# Altium footprint library PE42540F-Z.PcbLib: 3 footprints
Each footprint in its own frame and in the unit in brackets; x right, y up, seen from the top. Pads: shape width x height; smd on the part's side, far side on the other; paste and mask are expansions set on the pad; w line width, h text height; cw(c..) or ccw(c..) is an arc to the next point about the centre after c.
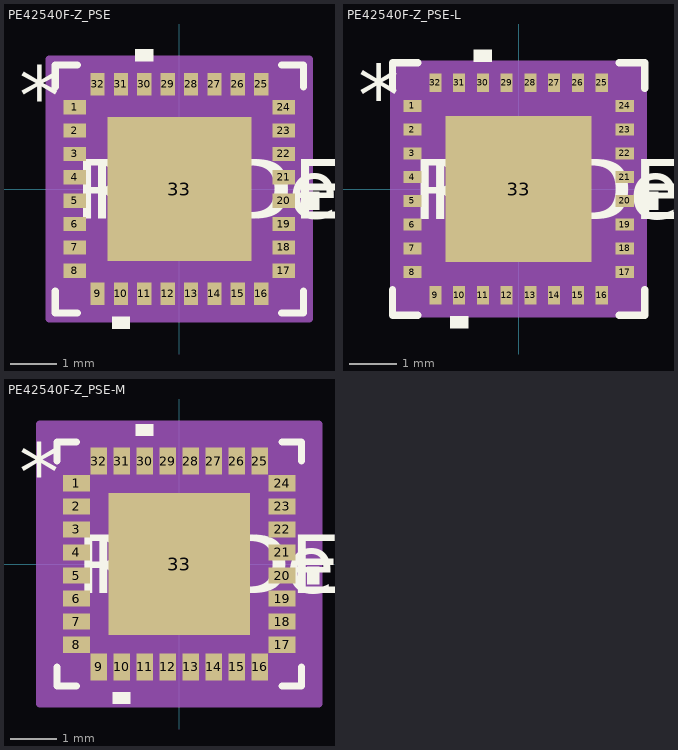
[diagram p0: the footprints below, top view; thin cyan lines are the x and y axes]

## PE42540F-Z_PSE [mil]
pads (33):
  rect 19x12 smd paste+0 mask+0: 1(-88,68.9) 2(-88,49.21) 3(-88,29.53) 4(-88,9.84) 5(-88,-9.84) 6(-88,-29.53) 7(-88,-49.21) 8(-88,-68.9) 17(88,-68.9) 18(88,-49.21) 19(88,-29.53) 20(88,-9.84) 21(88,9.84) 22(88,29.53) 23(88,49.21) 24(88,68.9)
  rect 12x19 smd paste+0 mask+0: 9(-68.9,-88) 10(-49.21,-88) 11(-29.53,-88) 12(-9.84,-88) 13(9.84,-88) 14(29.53,-88) 15(49.21,-88) 16(68.9,-88) 25(68.9,88) 26(49.21,88) 27(29.53,88) 28(9.84,88) 29(-9.84,88) 30(-29.53,88) 31(-49.21,88) 32(-68.9,88)
  rect 121x121 smd paste-60.5 mask+0: 33(0,0)
Top Overlay:
  region: -41.71,-107.5 -56.71,-107.5 -56.71,-117.5 -41.71,-117.5
  region: 107.5,-2.34 117.5,-2.34 117.5,-17.34 107.5,-17.34
  region: -22.03,107.5 -37.03,107.5 -37.03,117.5 -22.03,117.5
  lines w6: -104.5,-85.97 -104.5,-104.5 -85.97,-104.5 ; -104.5,85.97 -104.5,104.5 -85.97,104.5 ; 85.97,-104.5 104.5,-104.5 104.5,-85.97 ; 85.97,104.5 104.5,104.5 104.5,85.97
  text "*" at -135,53.74 h50
  text "RefDes" at -75,-25 h50
  text "REFDES" at -87.5,-25 h50
Top Paste:
  region: -3.94,56.56 -56.56,56.56 -56.56,3.94 -3.94,3.94
  region: -3.94,-3.94 -56.56,-3.94 -56.56,-56.56 -3.94,-56.56
  region: 56.56,56.56 3.94,56.56 3.94,3.94 56.56,3.94
  region: 56.56,-3.94 3.94,-3.94 3.94,-56.56 56.56,-56.56
Mechanical 13:
  lines w1: -99.5,49.5 -49.5,99.5 ; -99.5,-99.5 99.5,-99.5 ; -99.5,-99.5 -99.5,99.5 ; -99.5,-99.5 -99.5,-99.5 ; -99.5,99.5 99.5,99.5 ; -99.5,99.5 -99.5,99.5 ; 99.5,-99.5 99.5,-99.5 ; 99.5,-99.5 99.5,99.5 ; 99.5,99.5 99.5,99.5 ; -99.5,-74.9 -99.5,-62.9 -97.5,-62.9 -97.5,-74.9 -99.5,-74.9 ; -99.5,-55.21 -99.5,-43.21 -97.5,-43.21 -97.5,-55.21 -99.5,-55.21 ; -99.5,-35.53 -99.5,-23.53 -97.5,-23.53 -97.5,-35.53 -99.5,-35.53 ; -99.5,-15.84 -99.5,-3.84 -97.5,-3.84 -97.5,-15.84 -99.5,-15.84 ; -99.5,3.84 -99.5,15.84 -97.5,15.84 -97.5,3.84 -99.5,3.84 ; -99.5,23.53 -99.5,35.53 -97.5,35.53 -97.5,23.53 -99.5,23.53 ; -99.5,43.21 -99.5,55.21 -97.5,55.21 -97.5,43.21 -99.5,43.21 ; -99.5,62.9 -99.5,74.9 -97.5,74.9 -97.5,62.9 -99.5,62.9 ; -74.9,-99.5 -62.9,-99.5 -62.9,-97.5 -74.9,-97.5 -74.9,-99.5 ; -74.9,97.5 -62.9,97.5 -62.9,99.5 -74.9,99.5 -74.9,97.5 ; -55.21,-99.5 -43.21,-99.5 -43.21,-97.5 -55.21,-97.5 -55.21,-99.5 ; -55.21,97.5 -43.21,97.5 -43.21,99.5 -55.21,99.5 -55.21,97.5 ; -35.53,-99.5 -23.53,-99.5 -23.53,-97.5 -35.53,-97.5 -35.53,-99.5 ; -35.53,97.5 -23.53,97.5 -23.53,99.5 -35.53,99.5 -35.53,97.5 ; -15.84,-99.5 -3.84,-99.5 -3.84,-97.5 -15.84,-97.5 -15.84,-99.5 ; -15.84,97.5 -3.84,97.5 -3.84,99.5 -15.84,99.5 -15.84,97.5 ; 3.84,-99.5 15.84,-99.5 15.84,-97.5 3.84,-97.5 3.84,-99.5 ; 3.84,97.5 15.84,97.5 15.84,99.5 3.84,99.5 3.84,97.5 ; 23.53,-99.5 35.53,-99.5 35.53,-97.5 23.53,-97.5 23.53,-99.5 ; 23.53,97.5 35.53,97.5 35.53,99.5 23.53,99.5 23.53,97.5 ; 43.21,-99.5 55.21,-99.5 55.21,-97.5 43.21,-97.5 43.21,-99.5 ; 43.21,97.5 55.21,97.5 55.21,99.5 43.21,99.5 43.21,97.5 ; 62.9,-99.5 74.9,-99.5 74.9,-97.5 62.9,-97.5 62.9,-99.5 ; 62.9,97.5 74.9,97.5 74.9,99.5 62.9,99.5 62.9,97.5 ; 97.5,-74.9 99.5,-74.9 99.5,-62.9 97.5,-62.9 97.5,-74.9 ; 97.5,-55.21 99.5,-55.21 99.5,-43.21 97.5,-43.21 97.5,-55.21 ; 97.5,-35.53 99.5,-35.53 99.5,-23.53 97.5,-23.53 97.5,-35.53 ; 97.5,-15.84 99.5,-15.84 99.5,-3.84 97.5,-3.84 97.5,-15.84 ; 97.5,3.84 99.5,3.84 99.5,15.84 97.5,15.84 97.5,3.84 ; 97.5,23.53 99.5,23.53 99.5,35.53 97.5,35.53 97.5,23.53 ; 97.5,43.21 99.5,43.21 99.5,55.21 97.5,55.21 97.5,43.21 ; 97.5,62.9 99.5,62.9 99.5,74.9 97.5,74.9 97.5,62.9
  text "*" at -91,53.74 h50
  text "RefDes2" at -87.5,-25 h50
Mechanical 15:
  region: -84.9,-109.5 -109.5,-109.5 -109.5,-84.9 -109.5,84.9 -109.5,109.5 -84.9,109.5 84.9,109.5 109.5,109.5 109.5,84.9 109.5,-84.9 109.5,-109.5 84.9,-109.5
  lines w6: -109.5,-84.9 -109.5,-109.5 -84.9,-109.5 ; -109.5,-84.9 -109.5,-84.9 ; -109.5,-84.9 -109.5,84.9 ; -109.5,84.9 -109.5,84.9 ; -109.5,84.9 -109.5,109.5 -84.9,109.5 ; -84.9,-109.5 84.9,-109.5 ; -84.9,-109.5 -84.9,-109.5 ; -84.9,109.5 -84.9,109.5 ; -84.9,109.5 84.9,109.5 ; 84.9,-109.5 109.5,-109.5 109.5,-84.9 ; 84.9,-109.5 84.9,-109.5 ; 84.9,109.5 84.9,109.5 ; 84.9,109.5 109.5,109.5 109.5,84.9 ; 109.5,-84.9 109.5,84.9 ; 109.5,-84.9 109.5,-84.9 ; 109.5,84.9 109.5,84.9
3D body "PE42540F-Z_PSE.step": height 39.09, standoff 0, extent -99.49,-99.49 99.49,99.49

## PE42540F-Z_PSE-L [mil]
pads (33):
  rect 15x10 smd paste+0 mask+0: 1(-88,68.9) 2(-88,49.21) 3(-88,29.53) 4(-88,9.84) 5(-88,-9.84) 6(-88,-29.53) 7(-88,-49.21) 8(-88,-68.9) 17(88,-68.9) 18(88,-49.21) 19(88,-29.53) 20(88,-9.84) 21(88,9.84) 22(88,29.53) 23(88,49.21) 24(88,68.9)
  rect 10x15 smd paste+0 mask+0: 9(-68.9,-88) 10(-49.21,-88) 11(-29.53,-88) 12(-9.84,-88) 13(9.84,-88) 14(29.53,-88) 15(49.21,-88) 16(68.9,-88) 25(68.9,88) 26(49.21,88) 27(29.53,88) 28(9.84,88) 29(-9.84,88) 30(-29.53,88) 31(-49.21,88) 32(-68.9,88)
  rect 121x121 smd paste-60.5 mask+0: 33(0,0)
Top Overlay:
  region: -41.71,-105.5 -56.71,-105.5 -56.71,-115.5 -41.71,-115.5
  region: 105.5,-2.34 115.5,-2.34 115.5,-17.34 105.5,-17.34
  region: -22.03,105.5 -37.03,105.5 -37.03,115.5 -22.03,115.5
  lines w6: -104.5,-83.42 -104.5,-104.5 -83.42,-104.5 ; -104.5,83.42 -104.5,104.5 -83.42,104.5 ; 83.42,-104.5 104.5,-104.5 104.5,-83.42 ; 83.42,104.5 104.5,104.5 104.5,83.42
  text "*" at -133,53.74 h50
  text "RefDes" at -75,-25 h50
  text "REFDES" at -87.5,-25 h50
Top Paste:
  region: -3.94,56.56 -56.56,56.56 -56.56,3.94 -3.94,3.94
  region: -3.94,-3.94 -56.56,-3.94 -56.56,-56.56 -3.94,-56.56
  region: 56.56,56.56 3.94,56.56 3.94,3.94 56.56,3.94
  region: 56.56,-3.94 3.94,-3.94 3.94,-56.56 56.56,-56.56
Mechanical 13:
  lines w1: -99.5,49.5 -49.5,99.5 ; -99.5,-99.5 99.5,-99.5 ; -99.5,-99.5 -99.5,99.5 ; -99.5,-99.5 -99.5,-99.5 ; -99.5,99.5 99.5,99.5 ; -99.5,99.5 -99.5,99.5 ; 99.5,-99.5 99.5,-99.5 ; 99.5,-99.5 99.5,99.5 ; 99.5,99.5 99.5,99.5 ; -99.5,-74.9 -99.5,-62.9 -97.5,-62.9 -97.5,-74.9 -99.5,-74.9 ; -99.5,-55.21 -99.5,-43.21 -97.5,-43.21 -97.5,-55.21 -99.5,-55.21 ; -99.5,-35.53 -99.5,-23.53 -97.5,-23.53 -97.5,-35.53 -99.5,-35.53 ; -99.5,-15.84 -99.5,-3.84 -97.5,-3.84 -97.5,-15.84 -99.5,-15.84 ; -99.5,3.84 -99.5,15.84 -97.5,15.84 -97.5,3.84 -99.5,3.84 ; -99.5,23.53 -99.5,35.53 -97.5,35.53 -97.5,23.53 -99.5,23.53 ; -99.5,43.21 -99.5,55.21 -97.5,55.21 -97.5,43.21 -99.5,43.21 ; -99.5,62.9 -99.5,74.9 -97.5,74.9 -97.5,62.9 -99.5,62.9 ; -74.9,-99.5 -62.9,-99.5 -62.9,-97.5 -74.9,-97.5 -74.9,-99.5 ; -74.9,97.5 -62.9,97.5 -62.9,99.5 -74.9,99.5 -74.9,97.5 ; -55.21,-99.5 -43.21,-99.5 -43.21,-97.5 -55.21,-97.5 -55.21,-99.5 ; -55.21,97.5 -43.21,97.5 -43.21,99.5 -55.21,99.5 -55.21,97.5 ; -35.53,-99.5 -23.53,-99.5 -23.53,-97.5 -35.53,-97.5 -35.53,-99.5 ; -35.53,97.5 -23.53,97.5 -23.53,99.5 -35.53,99.5 -35.53,97.5 ; -15.84,-99.5 -3.84,-99.5 -3.84,-97.5 -15.84,-97.5 -15.84,-99.5 ; -15.84,97.5 -3.84,97.5 -3.84,99.5 -15.84,99.5 -15.84,97.5 ; 3.84,-99.5 15.84,-99.5 15.84,-97.5 3.84,-97.5 3.84,-99.5 ; 3.84,97.5 15.84,97.5 15.84,99.5 3.84,99.5 3.84,97.5 ; 23.53,-99.5 35.53,-99.5 35.53,-97.5 23.53,-97.5 23.53,-99.5 ; 23.53,97.5 35.53,97.5 35.53,99.5 23.53,99.5 23.53,97.5 ; 43.21,-99.5 55.21,-99.5 55.21,-97.5 43.21,-97.5 43.21,-99.5 ; 43.21,97.5 55.21,97.5 55.21,99.5 43.21,99.5 43.21,97.5 ; 62.9,-99.5 74.9,-99.5 74.9,-97.5 62.9,-97.5 62.9,-99.5 ; 62.9,97.5 74.9,97.5 74.9,99.5 62.9,99.5 62.9,97.5 ; 97.5,-74.9 99.5,-74.9 99.5,-62.9 97.5,-62.9 97.5,-74.9 ; 97.5,-55.21 99.5,-55.21 99.5,-43.21 97.5,-43.21 97.5,-55.21 ; 97.5,-35.53 99.5,-35.53 99.5,-23.53 97.5,-23.53 97.5,-35.53 ; 97.5,-15.84 99.5,-15.84 99.5,-3.84 97.5,-3.84 97.5,-15.84 ; 97.5,3.84 99.5,3.84 99.5,15.84 97.5,15.84 97.5,3.84 ; 97.5,23.53 99.5,23.53 99.5,35.53 97.5,35.53 97.5,23.53 ; 97.5,43.21 99.5,43.21 99.5,55.21 97.5,55.21 97.5,43.21 ; 97.5,62.9 99.5,62.9 99.5,74.9 97.5,74.9 97.5,62.9
  text "*" at -93,53.74 h50
  text "RefDes2" at -87.5,-25 h50
Mechanical 15:
  region: -77.9,-103.5 -103.5,-103.5 -103.5,-77.9 -103.5,77.9 -103.5,103.5 -77.9,103.5 77.9,103.5 103.5,103.5 103.5,77.9 103.5,-77.9 103.5,-103.5 77.9,-103.5
  lines w6: -103.5,-77.9 -103.5,-103.5 -77.9,-103.5 ; -103.5,-77.9 -103.5,-77.9 ; -103.5,-77.9 -103.5,77.9 ; -103.5,77.9 -103.5,77.9 ; -103.5,77.9 -103.5,103.5 -77.9,103.5 ; -77.9,-103.5 77.9,-103.5 ; -77.9,-103.5 -77.9,-103.5 ; -77.9,103.5 -77.9,103.5 ; -77.9,103.5 77.9,103.5 ; 77.9,-103.5 103.5,-103.5 103.5,-77.9 ; 77.9,-103.5 77.9,-103.5 ; 77.9,103.5 77.9,103.5 ; 77.9,103.5 103.5,103.5 103.5,77.9 ; 103.5,-77.9 103.5,77.9 ; 103.5,-77.9 103.5,-77.9 ; 103.5,77.9 103.5,77.9
3D body "PE42540F-Z_PSE.step": height 39.09, standoff 0, extent -99.49,-99.49 99.49,99.49

## PE42540F-Z_PSE-M [mil]
pads (33):
  rect 23x14 smd paste+0 mask+0: 1(-88,68.9) 2(-88,49.21) 3(-88,29.53) 4(-88,9.84) 5(-88,-9.84) 6(-88,-29.53) 7(-88,-49.21) 8(-88,-68.9) 17(88,-68.9) 18(88,-49.21) 19(88,-29.53) 20(88,-9.84) 21(88,9.84) 22(88,29.53) 23(88,49.21) 24(88,68.9)
  rect 14x23 smd paste+0 mask+0: 9(-68.9,-88) 10(-49.21,-88) 11(-29.53,-88) 12(-9.84,-88) 13(9.84,-88) 14(29.53,-88) 15(49.21,-88) 16(68.9,-88) 25(68.9,88) 26(49.21,88) 27(29.53,88) 28(9.84,88) 29(-9.84,88) 30(-29.53,88) 31(-49.21,88) 32(-68.9,88)
  rect 121x121 smd paste-60.5 mask+0: 33(0,0)
Top Overlay:
  region: -41.71,-109.5 -56.71,-109.5 -56.71,-119.5 -41.71,-119.5
  region: 109.5,-2.34 119.5,-2.34 119.5,-17.34 109.5,-17.34
  region: -22.03,109.5 -37.03,109.5 -37.03,119.5 -22.03,119.5
  lines w6: -104.5,-88.01 -104.5,-104.5 -88.01,-104.5 ; -104.5,88.01 -104.5,104.5 -88.01,104.5 ; 88.01,-104.5 104.5,-104.5 104.5,-88.01 ; 88.01,104.5 104.5,104.5 104.5,88.01
  text "*" at -137,53.74 h50
  text "RefDes" at -75,-25 h50
  text "REFDES" at -87.5,-25 h50
Top Paste:
  region: -3.94,56.56 -56.56,56.56 -56.56,3.94 -3.94,3.94
  region: -3.94,-3.94 -56.56,-3.94 -56.56,-56.56 -3.94,-56.56
  region: 56.56,56.56 3.94,56.56 3.94,3.94 56.56,3.94
  region: 56.56,-3.94 3.94,-3.94 3.94,-56.56 56.56,-56.56
Mechanical 13:
  lines w1: -99.5,49.5 -49.5,99.5 ; -99.5,-99.5 99.5,-99.5 ; -99.5,-99.5 -99.5,99.5 ; -99.5,-99.5 -99.5,-99.5 ; -99.5,99.5 99.5,99.5 ; -99.5,99.5 -99.5,99.5 ; 99.5,-99.5 99.5,-99.5 ; 99.5,-99.5 99.5,99.5 ; 99.5,99.5 99.5,99.5 ; -99.5,-74.9 -99.5,-62.9 -97.5,-62.9 -97.5,-74.9 -99.5,-74.9 ; -99.5,-55.21 -99.5,-43.21 -97.5,-43.21 -97.5,-55.21 -99.5,-55.21 ; -99.5,-35.53 -99.5,-23.53 -97.5,-23.53 -97.5,-35.53 -99.5,-35.53 ; -99.5,-15.84 -99.5,-3.84 -97.5,-3.84 -97.5,-15.84 -99.5,-15.84 ; -99.5,3.84 -99.5,15.84 -97.5,15.84 -97.5,3.84 -99.5,3.84 ; -99.5,23.53 -99.5,35.53 -97.5,35.53 -97.5,23.53 -99.5,23.53 ; -99.5,43.21 -99.5,55.21 -97.5,55.21 -97.5,43.21 -99.5,43.21 ; -99.5,62.9 -99.5,74.9 -97.5,74.9 -97.5,62.9 -99.5,62.9 ; -74.9,-99.5 -62.9,-99.5 -62.9,-97.5 -74.9,-97.5 -74.9,-99.5 ; -74.9,97.5 -62.9,97.5 -62.9,99.5 -74.9,99.5 -74.9,97.5 ; -55.21,-99.5 -43.21,-99.5 -43.21,-97.5 -55.21,-97.5 -55.21,-99.5 ; -55.21,97.5 -43.21,97.5 -43.21,99.5 -55.21,99.5 -55.21,97.5 ; -35.53,-99.5 -23.53,-99.5 -23.53,-97.5 -35.53,-97.5 -35.53,-99.5 ; -35.53,97.5 -23.53,97.5 -23.53,99.5 -35.53,99.5 -35.53,97.5 ; -15.84,-99.5 -3.84,-99.5 -3.84,-97.5 -15.84,-97.5 -15.84,-99.5 ; -15.84,97.5 -3.84,97.5 -3.84,99.5 -15.84,99.5 -15.84,97.5 ; 3.84,-99.5 15.84,-99.5 15.84,-97.5 3.84,-97.5 3.84,-99.5 ; 3.84,97.5 15.84,97.5 15.84,99.5 3.84,99.5 3.84,97.5 ; 23.53,-99.5 35.53,-99.5 35.53,-97.5 23.53,-97.5 23.53,-99.5 ; 23.53,97.5 35.53,97.5 35.53,99.5 23.53,99.5 23.53,97.5 ; 43.21,-99.5 55.21,-99.5 55.21,-97.5 43.21,-97.5 43.21,-99.5 ; 43.21,97.5 55.21,97.5 55.21,99.5 43.21,99.5 43.21,97.5 ; 62.9,-99.5 74.9,-99.5 74.9,-97.5 62.9,-97.5 62.9,-99.5 ; 62.9,97.5 74.9,97.5 74.9,99.5 62.9,99.5 62.9,97.5 ; 97.5,-74.9 99.5,-74.9 99.5,-62.9 97.5,-62.9 97.5,-74.9 ; 97.5,-55.21 99.5,-55.21 99.5,-43.21 97.5,-43.21 97.5,-55.21 ; 97.5,-35.53 99.5,-35.53 99.5,-23.53 97.5,-23.53 97.5,-35.53 ; 97.5,-15.84 99.5,-15.84 99.5,-3.84 97.5,-3.84 97.5,-15.84 ; 97.5,3.84 99.5,3.84 99.5,15.84 97.5,15.84 97.5,3.84 ; 97.5,23.53 99.5,23.53 99.5,35.53 97.5,35.53 97.5,23.53 ; 97.5,43.21 99.5,43.21 99.5,55.21 97.5,55.21 97.5,43.21 ; 97.5,62.9 99.5,62.9 99.5,74.9 97.5,74.9 97.5,62.9
  text "*" at -89,53.74 h50
  text "RefDes2" at -87.5,-25 h50
Mechanical 15:
  region: -95.9,-119.5 -119.5,-119.5 -119.5,-95.9 -119.5,95.9 -119.5,119.5 -95.9,119.5 95.9,119.5 119.5,119.5 119.5,95.9 119.5,-95.9 119.5,-119.5 95.9,-119.5
  lines w6: -119.5,-95.9 -119.5,-119.5 -95.9,-119.5 ; -119.5,-95.9 -119.5,-95.9 ; -119.5,-95.9 -119.5,95.9 ; -119.5,95.9 -119.5,95.9 ; -119.5,95.9 -119.5,119.5 -95.9,119.5 ; -95.9,-119.5 95.9,-119.5 ; -95.9,-119.5 -95.9,-119.5 ; -95.9,119.5 -95.9,119.5 ; -95.9,119.5 95.9,119.5 ; 95.9,-119.5 119.5,-119.5 119.5,-95.9 ; 95.9,-119.5 95.9,-119.5 ; 95.9,119.5 95.9,119.5 ; 95.9,119.5 119.5,119.5 119.5,95.9 ; 119.5,-95.9 119.5,95.9 ; 119.5,-95.9 119.5,-95.9 ; 119.5,95.9 119.5,95.9
3D body "PE42540F-Z_PSE.step": height 39.09, standoff 0, extent -99.49,-99.49 99.49,99.49